# Altium integrated library UCLAMP3324P.TCT.IntLib: 1 symbol
Pins are listed as number, name and electrical type; pins without a type are passive.

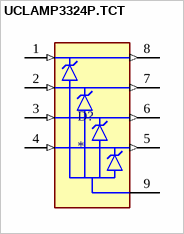
[diagram p0: symbol UCLAMP3324P.TCT]

## UCLAMP3324P.TCT
designator D?
8V Clamp 5A (8/20Âµs) Ipp Tvs Diode Surface Mount SLP2116P8 (2.1x1.6); MF: Semtech Corporation; MP: UCLAMP3324P.TCT; SnapEDA_Link: https://www.snapeda.com/parts/UCLAMP3324P.TCT/Semtech/view-part/?ref=snap; Package: UFDFN-8 Semtech Corporation; Value: *; Check_prices: https://www.snapeda.com/parts/UCLAMP3324P.TCT/Semtech/view-part/?ref=eda
footprint SON50P210X160X65-9N
pins: 1 (in), 2 (in), 3 (in), 4 (in), 5 (out), 6 (out), 7 (out), 8 (out), 9 GND (power)